# Altium schematic symbol library PCB_HEXAPODO.SCHLIB: 11 symbols
Pins are listed as number, name and electrical type; pins without a type are passive.

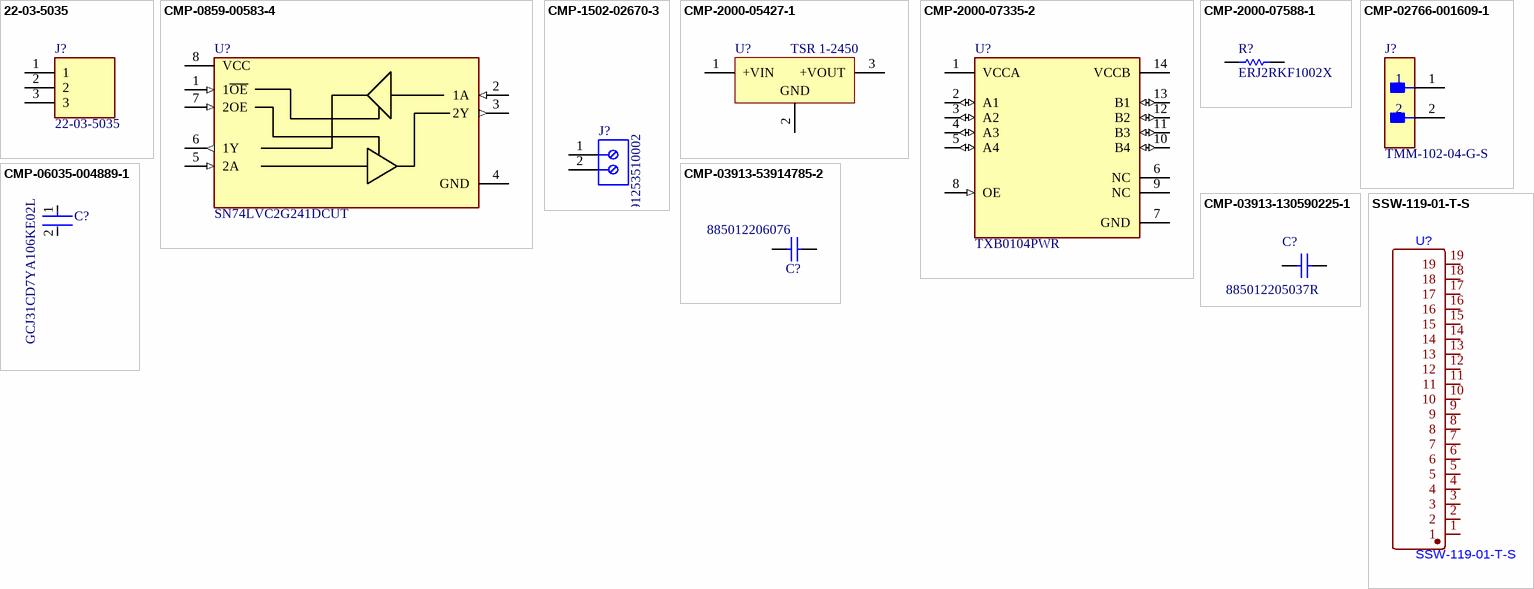
[diagram p0: symbols 22-03-5035 to SSW-119-01-T-S]

## 22-03-5035
designator J?
Header 2.5mm SPOX,WTB,vert, shrouded, 3w Molex SPOX Series, Series Number 5267, 2.5mm Pitch 3 Way 1 Row Straight PCB Header, Solder Termination, 3A; Geometry.Height: 5.9mm; Mouser Part Number: 538-22-03-5035; Mouser Price/Stock: https://www.mouser.co.uk/ProductDetail/Molex/22-03-5035?qs=VKrXD49J9Ep%252Bv2WwbOoiPA%3D%3D; Manufacturer_Name: Molex; Manufacturer_Part_Number: 22-03-5035; Datasheet Link: http://www.molex.com/pdm_docs/sd/022035035_sd.pdf
footprint SHDR3W60P0X250_1X3_990X490X590P
pins: 1, 2, 3

## CMP-0859-00583-4
designator U?, comment SN74LVC2G241DCUT
IC BUFFER NON-INVERT 5.5V US8; Number of Gates: 2; High Level Output Current: -32mA; Number of Bits per Element: 1; Quiescent Current: 10uA; Low Level Output Current: 32mA; Polarity: Non-Inverting; Min Supply Voltage: 1.65V; Output Type: 3-STATE; Turn-On Delay Time: 12.5ns; Propagation Delay: 3.7ns; Lead Free: Lead Free; RoHS Compliant: Yes; Number of Bits: 2; Case/Package: VSSOP; Package Quantity: 250; Mount: Surface Mount; Number of Input Lines: 2; Number of Channels: 2; Packaging: Tape and Reel; Logic Function: Buffer; Max Supply Voltage: 5.5V; Number of Outputs: 2; Series: 74LVC; Termination: SMD/SMT; Number of Pins: 8; Technology: CMOS; Contact Plating: Gold; Number of Output Lines: 2; Min Operating Temperature: -40°C; Number of Elements: 2; Max Operating Temperature: 125°C; Radiation Hardening: No; REACH SVHC: No SVHC; Number of Inputs: 2
footprint FP-DCU0008A-IPC_A
footprint FP-DCU0008A-IPC_B
footprint FP-DCU0008A-IPC_C
footprint FP-DCU0008A-MFG
footprint FP-DCU0008A-IPC_A
pins: 1 1~{OE} (in), 2 1A (in), 3 2Y (out), 4 GND (power), 5 2A (in), 6 1Y (out), 7 2OE (in), 8 VCC (power)

## CMP-1502-02670-3
designator J?, comment 691253510002
Terminal Block, Wtb, 2Way, 30-12Awg Rohs Compliant: Yes; Number of Contacts: 2; Voltage Rating: 300V; Current Rating: 16A; Min Operating Temperature: -30°C; RoHS: Compliant; Number of Rows: 1; Max Operating Temperature: 120°C; Height: 18.1mm; Contact Material: Nickel, Tin
footprint 691253510002
pins: 1, 2

## CMP-2000-05427-1
designator U?, comment TSR 1-2450
DC/DC converter, 5 VDC, 1000 mA, -40 to 85 degC, 3-Pin SIP, RoHS; Manufacturer: Tracopower; Output Voltage Nom.: 5V; Output Current Max: 1A; Product Range: TSR-1Series; DC / DC Converter Mounting: ThroughHole; Output Power Max: 5W; No. of Outputs: 1Output; Input Voltage DC Max: 36V; Approvals & Standards: IEC,UL; Input Voltage DC Min: 6.5V; DC / DC Converter Output Type: Fixed; Depth: 11.7mm; Package Reference: SIP-3; DC / DC Converter Type: SIP; Height: 10.2mm; Width: 7.6mm; Package Description: 3-Pin Single In-line Package, Body 11.7 x 7.6 mm, Pitch 2.54 mm; Manufacturer URL: http://www.tracopower.com/home; Datasheet Version: Jan-15; Datasheet URL: https://datasheet.ciiva.com/6815/tsr1-6815641.pdf
footprint TRACO-SIP-3_V (SIP, 3-Leads, Body 11.7x7.6mm, Pitch 2.54mm)
pins: 1 +VIN (power), 2 GND (power), 3 +VOUT (power)

## CMP-2000-07335-2
designator U?, comment TXB0104PWR
NexarPartId: 1486292; Manufacturer Lifecycle Status: ACTIVE; Quiescent Current: 3.5µA; Number of Circuits: 1; Logic Function: Translator; Number of Bits: 4; Max Supply Voltage: 5.5V; Low Level Output Current: 20µA; Data Rate: 100Mbps; Nominal Supply Current: 5µA; Turn-On Delay Time: 31ns; Propagation Delay: 4ns; High Level Output Current: -20µA; Min Supply Voltage: 1.2V; Rise Time: 700ps; Max Junction Temperature (Tj): 150°C; Number of Outputs: 4; Ambient Temperature Range High: 85°C; Width: 4.4mm; Height: 1.2mm; Radiation Hardening: No; Case/Package: TSSOP; Number of Inputs: 4; Packaging: Digi-Reel®; RoHS: Compliant; Weight: 57.209338mg; Length: 5mm; REACH SVHC: No SVHC; Min Supply Voltage (DC): 1.2V; Min Operating Temperature: -40°C; Number of Channels: 4; Number of Pins: 14; Schedule B: 8542390000, 8542390000; Max Operating Temperature: 85°C; Output Current: 20µA; Thickness: 1mm; Lead Free: Lead Free; Lifecycle Status: Production; Mount: Surface Mount
footprint Texas_Instruments_PW0014A_MFG (4-Bit Bidirectional Voltage-Level Shifter with Auto Direction Sensing and +/-15 kV ESD Protect 14-TSSOP -40 to 85)
footprint Texas_Instruments_PW0014A_IPC_A (4-Bit Bidirectional Voltage-Level Shifter with Auto Direction Sensing and +/-15 kV ESD Protect 14-TSSOP -40 to 85)
footprint Texas_Instruments_PW0014A_IPC_B (4-Bit Bidirectional Voltage-Level Shifter with Auto Direction Sensing and +/-15 kV ESD Protect 14-TSSOP -40 to 85)
footprint Texas_Instruments_PW0014A_IPC_C (4-Bit Bidirectional Voltage-Level Shifter with Auto Direction Sensing and +/-15 kV ESD Protect 14-TSSOP -40 to 85)
pins: 1 VCCA (power), 2 A1 (io), 3 A2 (io), 4 A3 (io), 5 A4 (io), 6 NC, 7 GND (power), 8 OE (in), 9 NC, 10 B4 (io), 11 B3 (io), 12 B2 (io), 13 B1 (io), 14 VCCB (power)

## CMP-2000-07588-1
designator R?, comment ERJ2RKF1002X
Chip Resistor, 10 KOhm, +/- 1%, 0.1 W, -55 to 155 degC, 0402 (1005 Metric), RoHS, Tape and Reel; Manufacturer: Panasonic; Power Rating: 100mW; Voltage Rating: 50V; Resistance: 10KOhm; Case\/Package: 0402; Temperature Coefficient: 100ppm\/degreesC; RoHSCompliant: True; Lead Free: LeadFree; Package Quantity: 1; Contact Plating: Tin; Length: 1mm; Radiation Hardening: No; REACH SVHC: NoSVHC; Max Operating Temperature: 155degC; Depth: 0.5mm; Case Code (Imperial): 0402; Military Standard: Not; Package Description: 2-Pin Surface Mount Device, Body 1 x 0.5 mm; Termination: SMD/SMT; Case Code (Metric): 1005; Height: 0.35mm; Packaging: TapeandReel; Voltage Rating (DC): 50V; Package Reference: 402; Number of Pins: 2; Tolerance: 1%; Mounting Technology: SurfaceMount; Width: 0.02inch; Mount: SurfaceMount; Datasheet URL: https://industrial.panasonic.com/cdbs/www-data/pdf/RDA0000/AOA0000C304.pdf; Composition: ThickFilm; Datasheet Version: 02/2017; Manufacturer URL: http://www.panasonic.com/; Max Power Dissipation: 100mW; Number of Terminations: 2; Min Operating Temperature: -55degC
footprint RESC1005X40X25LL05T05 (Chip Resistor, 2-Leads, Body 1.05x0.55mm, IPC High Density)
footprint RESC1005X40X25ML05T05 (Chip Resistor, 2-Leads, Body 1.05x0.55mm, IPC Low Density)
footprint RESC1005X40X25NL05T05 (Chip Resistor, 2-Leads, Body 1.05x0.55mm, IPC Medium Density)
pins: 1, 2

## CMP-02766-001609-1
designator J?, comment TMM-102-04-G-S
2MM TERMINAL STRIP; Max Voltage Rating (AC): 500V; Max Current Rating: 3.9A; Number of Contacts: 2; Gender: Male; Length: 4mm; Termination: Solder; Number of Rows: 1; Depth: 1.97mm; RoHS Compliant: Yes; Orientation: Straight; Packaging: Bulk; Pitch: 2mm; Max Operating Temperature: 125°C; Contact Material: Bronze; Radiation Hardening: No; Contact Plating: Gold; Housing Color: Black; Min Operating Temperature: -55°C; Housing Material: Polymer
footprint FP-TMM-102-04-G-S-MFG
pins: 1, 2

## CMP-03913-53914785-2
designator C?, comment 885012206076
1UF Multilayer Ceramic Capacitor Mlcc 25 V , X7R Dielectric 0603 Surface Mount; Voltage Rating: 25V; Tolerance: 10%; Capacitance: 1µF; Insulation Resistance: 500MΩ; Height: 800µm; Case Code (Metric): 1608; Min Operating Temperature: -55°C; Dielectric: X7R; Material: Ceramic; REACH SVHC: Unknown; Case/Package: 0603; Width: 800µm; Case Code (Imperial): 0603; Length: 1.6mm; Mount: Surface Mount; Max Operating Temperature: 125°C; RoHS: Compliant; Thickness: 939.8µm; Voltage Rating (DC): 25V
footprint WCAP-CSGP_0603_L1.6W0.8H0.8_Reflow
pins: 1, 2

## CMP-03913-130590225-1
designator C?, comment 885012205037R
Cap, 0.1Uf, 16V, Mlcc, 0402 Rohs Compliant: Yes; Insulation Resistance: 5GΩ; Capacitance: 100nF; Min Operating Temperature: -55°C; Voltage Rating: 16V; Height: 500µm; Max Operating Temperature: 125°C; Width: 500µm; RoHS: Compliant; Length: 1mm
footprint WCAP-CSGP_0402_L1W0.5H0.5
pins: 1, 2

## CMP-06035-004889-1
designator C?, comment GCJ31CD7YA106KE02L
Cap Ceramic 10uF 35V X7T 10% SMD 1206 +125°C Embossed Plastic T/R
footprint FP-GCJ31C-0_4-IPC_C
footprint FP-GCJ31C-0_4-IPC_B
footprint FP-GCJ31C-0_4-IPC_A
footprint FP-GCJ31C-0_4-MFG
pins: 1, 2

## SSW-119-01-T-S
designator U?
footprint MORS_19P (Footprint not found)
footprint HDR-TH_ESW-119-37-S-S
pins: 1, 2, 3, 4, 5, 6, 7, 8, 9, 10, 11, 12, 13, 14, 15, 16, 17, 18, 19